# Altium footprint library PBL - THD Packages.PcbLib: 160 footprints (part 6 of 10)
Each footprint in its own frame and in the unit in brackets; x right, y up, seen from the top. Pads: shape width x height; smd on the part's side, far side on the other; paste and mask are expansions set on the pad; w line width, h text height; cw(c..) or ccw(c..) is an arc to the next point about the centre after c.
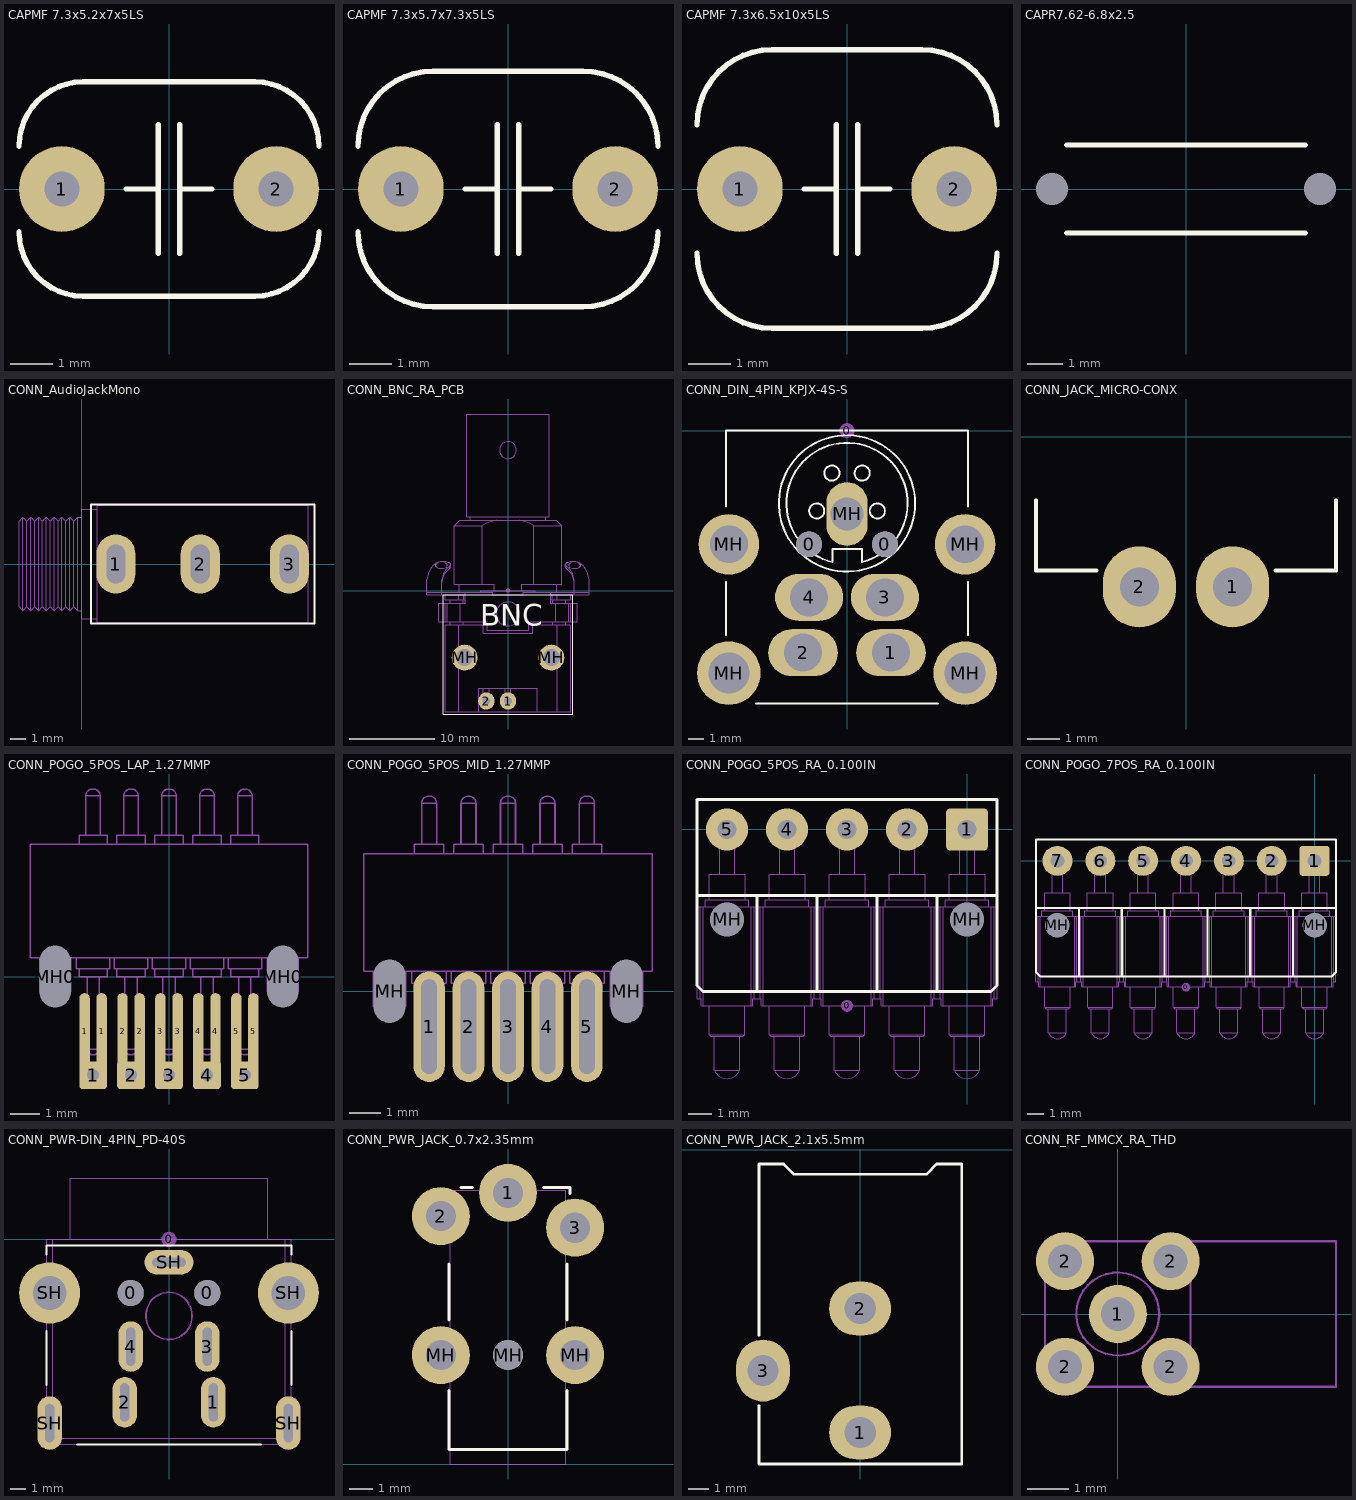
[diagram p5: the footprints below, top view; thin cyan lines are the x and y axes]

## CAPMF 7.3x5.2x7x5LS [mm] "Capacitor, THT, Metallized Polyester Film"
height 7
pads (2):
  round 2 hole 0.813: 1(-2.5,0) 2(2.5,0)
Top Overlay:
  lines w0.127: -3.5,-1 ccw(c-2,-1) -2,-2.5 2,-2.5 ccw(c2,-1) 3.5,-1 ; -3.5,1 cw(c-2,1) -2,2.5 2,2.5 cw(c2,1) 3.5,1 ; -1,0 -0.25,0 ; -0.25,-1.5 -0.25,1.5 ; 0.25,-1.5 0.25,1.5 ; 0.25,0 1,0
3D body: height 8, standoff -2, extent -3.65,-2.6 3.65,2.6

## CAPMF 7.3x5.7x7.3x5LS [mm] "Capacitor, THT, Metallized Polyester Film"
height 7
pads (2):
  round 2 hole 0.813: 1(-2.5,0) 2(2.5,0)
Top Overlay:
  lines w0.127: -3.5,-1 ccw(c-1.75,-1) -1.75,-2.75 1.75,-2.75 ccw(c1.75,-1) 3.5,-1 ; -3.5,1 cw(c-1.75,1) -1.75,2.75 1.75,2.75 cw(c1.75,1) 3.5,1 ; -1,0 -0.25,0 ; -0.25,-1.5 -0.25,1.5 ; 0.25,-1.5 0.25,1.5 ; 0.25,0 1,0
3D body: height 8.3, standoff -2, extent -3.65,-2.85 3.65,2.85

## CAPMF 7.3x6.5x10x5LS [mm] "Capacitor, THT, Metallized Polyester Film"
height 10
pads (2):
  round 2 hole 0.813: 1(-2.5,0) 2(2.5,0)
Top Overlay:
  lines w0.127: -3.5,-1.5 ccw(c-1.75,-1.5) -1.75,-3.25 1.75,-3.25 ccw(c1.75,-1.5) 3.5,-1.5 ; -3.5,1.5 cw(c-1.75,1.5) -1.75,3.25 1.75,3.25 cw(c1.75,1.5) 3.5,1.5 ; -1,0 -0.25,0 ; -0.25,-1.5 -0.25,1.5 ; 0.25,-1.5 0.25,1.5 ; 0.25,0 1,0
3D body: height 11, standoff -2, extent -3.65,-3.25 3.65,3.25

## CAPR7.62-6.8x2.5 [mil] "Capacitor, MF, Thru-Hole, Dipped Radial; Body 6.8 x 2.5 mm (WxT) Pin Spacing 7.62 mm (typ)"
height 236.22
pads (2):
  round 0 / inner round 0 / far side oval 100x85 hole 36 unplated: 1(-150,0) 2(150,0)
Top Overlay:
  lines w6: -133.86,-49.21 133.86,-49.21 ; -133.86,49.21 133.86,49.21
3D body: height 511.81, standoff -100, extent -202.75,-118.1 202.76,118.12

## CONN_AudioJackMono [mm] "CUI MJ-3502 3.5mm audio jack - mono"
height 11.3
pads (3):
  oval 2.5x3.8 hole 1.2 slot 2.5 at 90 deg: 1(2.2,0) 2(7.6,0) 3(13.3,0)
Top Overlay:
  lines w0.127: 0.6,-3.8 0.6,3.8 14.9,3.8 14.9,-3.8 0.6,-3.8
13 - 3D Top Side:
  lines w0.05: 0,-3 -0.25,-3 ; 0,3 -0.25,3 ; 1,-3.5 0,-3.5 0,3.5 1,3.5 ; -3.75,-3 -4,-2.75 -4,2.75 -3.75,3 ; -3.75,-3 -3.5,-2.75 ; -3.75,-3 -3.75,3 ; -3.75,3 -3.5,2.75 ; -3.5,-2.75 -3.25,-3 ; -3.5,-2.75 -3.5,2.75 ; -3.5,2.75 -3.25,3 ; -3.25,-3 -3,-2.75 ; -3.25,-3 -3.25,3 ; -3.25,3 -3,2.75 ; -3,-2.75 -2.75,-3 ; -3,-2.75 -3,2.75 ; -3,2.75 -2.75,3 ; -2.75,-3 -2.5,-2.75 ; -2.75,-3 -2.75,3 ; -2.75,3 -2.5,2.75 ; -2.5,-2.75 -2.25,-3 ; -2.5,-2.75 -2.5,2.75 ; -2.5,2.75 -2.25,3 ; -2.25,-3 -2,-2.75 ; -2.25,-3 -2.25,3 ; -2.25,3 -2,2.75 ; -2,-2.75 -1.75,-3 ; -2,-2.75 -2,2.75 ; -2,2.75 -1.75,3 ; -1.75,-3 -1.5,-2.75 ; -1.75,-3 -1.75,3 ; -1.75,3 -1.5,2.75 ; -1.5,-2.75 -1.25,-3 ; -1.5,-2.75 -1.5,2.75 ; -1.5,2.75 -1.25,3 ; -1.25,-3 -1,-2.75 ; -1.25,-3 -1.25,3 ; -1.25,3 -1,2.75 ; -1,-2.75 -0.75,-3 ; -1,-2.75 -1,2.75 ; -1,2.75 -0.75,3 ; -0.75,-3 -0.5,-2.75 ; -0.75,-3 -0.75,3 ; -0.75,3 -0.5,2.75 ; -0.5,-2.75 -0.25,-3 ; -0.5,-2.75 -0.5,2.75 ; -0.5,2.75 -0.25,3 ; -0.25,-3 -0.25,3 ; 1,-3.75 14.5,-3.75 14.5,3.75 1,3.75 1,-3.75
3D body: height 11.3, standoff -4.1, extent -4,-3.75 14.5,3.75

## CONN_BNC_RA_PCB [mil] "BNC connector, right angle PCB-mounted"
height 530
pads (5):
  round 20 on Mech15: 0(0,0)
  oval 75x80 hole 35: 1(0,-510) 2(-100,-510)
  round 120 hole 79: MH(-200,-310) MH(200,-310)
Top Overlay:
  lines w5: -300,-570 -300,-20 300,-20 300,-570 -300,-570
  text "BNC" at -127.35,-163 h100
13 - 3D Top Side:
  drawing of 173 lines, arcs and shapes, not listed
3D body: height 532, standoff -135, extent -375,-559.78 375,815.22

## CONN_DIN_4PIN_KPJX-4S-S [mm] "Power Connector, 4-pin DIN"
height 15
pads (12):
  round 1.7 hole 1.7 unplated: 0(-2.5,-7.5) 0(2.5,-7.5)
  round 1 on Mech15: 0(0,0)
  oval 4.6x3.1 hole 2.5: 1(2.9,-14.65) 2(-2.9,-14.65)
  oval 4.5x3.1 hole 2.5: 3(2.5,-11) 4(-2.5,-11)
  round 4.2 hole 2.7: MH(-7.8,-16) MH(7.8,-16)
  round 4 hole 2.5: MH(-7.8,-7.5) MH(7.8,-7.5)
  oval 2.7x4.2 hole 2.2: MH(0,-5.5)
Top Overlay:
  circle w0.127: c2,-5.3 r0.5
  circle w0.127: c-2,-5.3 r0.5
  circle w0.127: c-1,-2.8 r0.5
  circle w0.127: c1,-2.8 r0.5
  circle w0.127: c0,-4.8 r4.5
  lines w0.127: -8,-13.5 -8,-10 ; -8,-5 -8,0 8,0 8,-5 ; -6,-18 6,-18 ; 1,-8.671 1,-7.8 -0.97,-7.8 -0.97,-8.681 cw(c0,-4.8) 1.007,-8.671 ; 8,-13.5 8,-10
3D body: height 15.01, standoff -3.49, extent -8,-17.65 8,0

## CONN_JACK_MICRO-CONX [mil] "Micro-ConX 17292-2PG-300"
height 480
pads (2):
  oval 90x100 hole 48: 1(57.5,-185) 2(-57.5,-185)
Top Overlay:
  lines w5: -185,-78.74 -185,-165 -110.24,-165 ; 110.24,-165 185,-165 185,-78.74
3D body: height 476.88, standoff -146.88, extent -312.51,-205 310.03,547.5

## CONN_POGO_5POS_LAP_1.27MMP [mm] "Programming connector; lap-soldered 5 Position pogo style, 0.050\" pitch"
height 1.308
pads (17):
  oval 0.35x2.54 smd: 1(-2.825,-1.825) 1(-2.255,-1.825) 2(-1.555,-1.825) 2(-0.985,-1.825) 3(-0.285,-1.825) 3(0.285,-1.825) 4(0.985,-1.825) 4(1.555,-1.825) 5(2.255,-1.825) 5(2.825,-1.825)
  rrect20% 0.925x0.925 hole 0.4 mask+0.1: 1(-2.54,-3.3) 2(-1.27,-3.3) 3(0,-3.3) 4(1.27,-3.3) 5(2.54,-3.3)
  oval 0.991x2.007 hole 1.041 slot 2.057 at 90 deg unplated: MH0(-3.81,0) MH0(3.81,0)
Top Solder:
  rectangle: 2.255,-3.075 2.83,-0.575
  rectangle: 0.985,-3.075 1.56,-0.575
  rectangle: -0.285,-3.075 0.29,-0.575
  rectangle: -1.555,-3.075 -0.98,-0.575
  rectangle: -2.825,-3.075 -2.25,-0.575
13 - 3D Top Side:
  lines w0.05: -4.331,0.635 -4.331,-0.508 -3.289,-0.508 -3.289,0.635 ; -3.099,0.635 -3.099,0.254 -1.981,0.254 -1.981,0.635 ; -3.01,0.254 -3.01,0 -2.07,0 -2.07,0.254 ; -3.01,4.42 -3.01,4.724 -2.07,4.724 -2.07,4.42 ; -2.781,4.724 -2.781,6.045 ; -2.743,0 -2.743,-2.438 ; -2.337,0 -2.337,-2.438 ; -2.299,4.724 -2.299,6.045 ; -1.829,0.635 -1.829,0.254 -0.711,0.254 -0.711,0.635 ; -1.74,0.254 -1.74,0 -0.8,0 -0.8,0.254 ; -1.74,4.42 -1.74,4.724 -0.8,4.724 -0.8,4.42 ; -1.511,4.724 -1.511,6.045 ; -1.473,0 -1.473,-2.438 ; -1.067,0 -1.067,-2.438 ; -1.029,4.724 -1.029,6.045 ; -0.559,0.635 -0.559,0.254 0.559,0.254 0.559,0.635 ; -0.47,0.254 -0.47,0 0.47,0 0.47,0.254 ; -0.47,4.42 -0.47,4.724 0.47,4.724 0.47,4.42 ; -0.241,4.724 -0.241,6.045 ; -0.203,0 -0.203,-2.438 ; 0.203,0 0.203,-2.438 ; 0.241,4.724 0.241,6.045 ; 0.711,0.635 0.711,0.254 1.829,0.254 1.829,0.635 ; 0.8,0.254 0.8,0 1.74,0 1.74,0.254 ; 0.8,4.42 0.8,4.724 1.74,4.724 1.74,4.42 ; 1.029,4.724 1.029,6.045 ; 1.067,0 1.067,-2.438 ; 1.473,0 1.473,-2.438 ; 1.511,4.724 1.511,6.045 ; 1.981,0.635 1.981,0.254 3.099,0.254 3.099,0.635 ; 2.07,0.254 2.07,0 3.01,0 3.01,0.254 ; 2.07,4.42 2.07,4.724 3.01,4.724 3.01,4.42 ; 2.299,4.724 2.299,6.045 ; 2.337,0 2.337,-2.438 ; 2.743,0 2.743,-2.438 ; 2.781,4.724 2.781,6.045 ; 3.289,0.635 3.289,-0.508 4.331,-0.508 4.331,0.635 ; -2.781,6.045 cw(c-2.553,6.045) -2.553,6.274 -2.527,6.274 cw(c-2.527,6.045) -2.299,6.045 ; -2.781,6.045 -2.299,6.045 ; -2.743,-2.438 ccw(c-2.565,-2.438) -2.565,-2.616 -2.515,-2.616 ccw(c-2.515,-2.438) -2.337,-2.438 ; -2.743,-2.438 -2.337,-2.438 ; -1.511,6.045 cw(c-1.283,6.045) -1.283,6.274 -1.257,6.274 cw(c-1.257,6.045) -1.029,6.045 ; -1.511,6.045 -1.029,6.045 ; -1.473,-2.438 ccw(c-1.295,-2.438) -1.295,-2.616 -1.245,-2.616 ccw(c-1.245,-2.438) -1.067,-2.438 ; -1.473,-2.438 -1.067,-2.438 ; -0.241,6.045 cw(c-0.013,6.045) -0.013,6.274 0.013,6.274 cw(c0.013,6.045) 0.241,6.045 ; -0.241,6.045 0.241,6.045 ; -0.203,-2.438 ccw(c-0.025,-2.438) -0.025,-2.616 0.025,-2.616 ccw(c0.025,-2.438) 0.203,-2.438 ; -0.203,-2.438 0.203,-2.438 ; 1.029,6.045 cw(c1.257,6.045) 1.257,6.274 1.283,6.274 cw(c1.283,6.045) 1.511,6.045 ; 1.029,6.045 1.511,6.045 ; 1.067,-2.438 ccw(c1.245,-2.438) 1.245,-2.616 1.295,-2.616 ccw(c1.295,-2.438) 1.473,-2.438 ; 1.067,-2.438 1.473,-2.438 ; 2.299,6.045 cw(c2.527,6.045) 2.527,6.274 2.553,6.274 cw(c2.553,6.045) 2.781,6.045 ; 2.299,6.045 2.781,6.045 ; 2.337,-2.438 ccw(c2.515,-2.438) 2.515,-2.616 2.565,-2.616 ccw(c2.565,-2.438) 2.743,-2.438 ; 2.337,-2.438 2.743,-2.438 ; -4.635,0.635 4.635,0.635 4.635,4.42 -4.635,4.42 -4.635,0.635
3D body: height 1.31, standoff -0.9, extent -4.635,-2.616 4.636,6.274

## CONN_POGO_5POS_MID_1.27MMP [mil] "Programming connector; lap-soldered 5 Position pogo style, 0.050\" pitch"
height 13
pads (7):
  oval 40x140 hole 20 slot 120 at 90 deg: 1(-100,-45) 2(-50,-45) 3(0,-45) 4(50,-45) 5(100,-45)
  oval 38x78 hole 40 slot 80 at 90 deg unplated: MH(-150,0) MH(150,0)
Top Overlay:
  text "." at -100,-150 h3.94
Bottom Overlay:
  text "." at -100,-150 h3.94
13 - 3D Top Side:
  lines w1.97: -170.5,25 -170.5,-20 -129.5,-20 -129.5,25 ; -122,25 -122,10 -78,10 -78,25 ; -118.5,10 -118.5,0 -81.5,0 -81.5,10 ; -118.5,174 -118.5,186 -81.5,186 -81.5,174 ; -109.5,186 -109.5,238 ; -108,0 -108,-96 ; -92,0 -92,-96 ; -90.5,186 -90.5,238 ; -72,25 -72,10 -28,10 -28,25 ; -68.5,10 -68.5,0 -31.5,0 -31.5,10 ; -68.5,174 -68.5,186 -31.5,186 -31.5,174 ; -59.5,186 -59.5,238 ; -58,0 -58,-96 ; -42,0 -42,-96 ; -40.5,186 -40.5,238 ; -22,25 -22,10 22,10 22,25 ; -18.5,10 -18.5,0 18.5,0 18.5,10 ; -18.5,174 -18.5,186 18.5,186 18.5,174 ; -9.5,186 -9.5,238 ; -8,0 -8,-96 ; 8,0 8,-96 ; 9.5,186 9.5,238 ; 28,25 28,10 72,10 72,25 ; 31.5,10 31.5,0 68.5,0 68.5,10 ; 31.5,174 31.5,186 68.5,186 68.5,174 ; 40.5,186 40.5,238 ; 42,0 42,-96 ; 58,0 58,-96 ; 59.5,186 59.5,238 ; 78,25 78,10 122,10 122,25 ; 81.5,10 81.5,0 118.5,0 118.5,10 ; 81.5,174 81.5,186 118.5,186 118.5,174 ; 90.5,186 90.5,238 ; 92,0 92,-96 ; 108,0 108,-96 ; 109.5,186 109.5,238 ; 129.5,25 129.5,-20 170.5,-20 170.5,25 ; -109.5,238 cw(c-100.5,238) -100.5,247 -99.5,247 cw(c-99.5,238) -90.5,238 ; -109.5,238 -90.5,238 ; -108,-96 ccw(c-101,-96) -101,-103 -99,-103 ccw(c-99,-96) -92,-96 ; -108,-96 -92,-96 ; -59.5,238 cw(c-50.5,238) -50.5,247 -49.5,247 cw(c-49.5,238) -40.5,238 ; -59.5,238 -40.5,238 ; -58,-96 ccw(c-51,-96) -51,-103 -49,-103 ccw(c-49,-96) -42,-96 ; -58,-96 -42,-96 ; -9.5,238 cw(c-0.5,238) -0.5,247 0.5,247 cw(c0.5,238) 9.5,238 ; -9.5,238 9.5,238 ; -8,-96 ccw(c-1,-96) -1,-103 1,-103 ccw(c1,-96) 8,-96 ; -8,-96 8,-96 ; 40.5,238 cw(c49.5,238) 49.5,247 50.5,247 cw(c50.5,238) 59.5,238 ; 40.5,238 59.5,238 ; 42,-96 ccw(c49,-96) 49,-103 51,-103 ccw(c51,-96) 58,-96 ; 42,-96 58,-96 ; 90.5,238 cw(c99.5,238) 99.5,247 100.5,247 cw(c100.5,238) 109.5,238 ; 90.5,238 109.5,238 ; 92,-96 ccw(c99,-96) 99,-103 101,-103 ccw(c101,-96) 108,-96 ; 92,-96 108,-96 ; -182.5,25 -182.5,174 182.5,174 182.5,25 -182.5,25
3D body: height 12.5, standoff -74.5, extent -182.49,-102.99 182.51,247

## CONN_POGO_5POS_RA_0.100IN [mil] "Connector; Pogo pins; 5 Position"
height 100
pads (8):
  round 20 on Mech15: 0(-200,-294)
  rrect20% 70x70 hole 32: 1(0,0)
  round 70 hole 32: 2(-100,0) 3(-200,0) 4(-300,0) 5(-400,0)
  round 55 hole 57 unplated: MH(-400,-150) MH(0,-150)
Top Overlay:
  lines w5: -450,-110 50,-110 ; -350,-270 -350,-110 ; -250,-270 -250,-110 ; -150,-270 -150,-110 ; -50,-270 -50,-110 ; -450,-260 -450,50 50,50 50,-260 40,-270 -440,-270 -450,-260
13 - 3D Top Side:
  lines w1.97: -445,-282 -445,-129 ; -440,-294 -440,-129 ; -436,-129 -436,-117 -364,-117 -364,-129 ; -430,-117 -430,-75 -370,-75 -370,-117 ; -429.5,-294 -429.5,-342.17 ; -421,-345 -421,-400.97 ; -412.5,-75 -412.5,0 cw(c-400,0) -387.5,0 -387.5,-75 ; -412.5,-25 -387.5,-25 ; -379,-345 -379,-400.97 ; -370.5,-294 -370.5,-342.17 ; -360,-294 -360,-129 ; -355,-282 -355,-129 ; -345,-282 -345,-129 ; -340,-294 -340,-129 ; -336,-129 -336,-117 -264,-117 -264,-129 ; -330,-117 -330,-75 -270,-75 -270,-117 ; -329.5,-294 -329.5,-342.17 ; -321,-345 -321,-400.97 ; -312.5,-75 -312.5,0 cw(c-300,0) -287.5,0 -287.5,-75 ; -312.5,-25 -287.5,-25 ; -279,-345 -279,-400.97 ; -270.5,-294 -270.5,-342.17 ; -260,-294 -260,-129 ; -255,-282 -255,-129 ; -245,-282 -245,-129 ; -240,-294 -240,-129 ; -236,-129 -236,-117 -164,-117 -164,-129 ; -230,-117 -230,-75 -170,-75 -170,-117 ; -229.5,-294 -229.5,-342.17 ; -221,-345 -221,-400.97 ; -212.5,-75 -212.5,0 cw(c-200,0) -187.5,0 -187.5,-75 ; -212.5,-25 -187.5,-25 ; -179,-345 -179,-400.97 ; -170.5,-294 -170.5,-342.17 ; -160,-294 -160,-129 ; -155,-282 -155,-129 ; -145,-282 -145,-129 ; -140,-294 -140,-129 ; -136,-129 -136,-117 -64,-117 -64,-129 ; -130,-117 -130,-75 -70,-75 -70,-117 ; -129.5,-294 -129.5,-342.17 ; -121,-345 -121,-400.97 ; -112.5,-75 -112.5,0 cw(c-100,0) -87.5,0 -87.5,-75 ; -112.5,-25 -87.5,-25 ; -79,-345 -79,-400.97 ; -70.5,-294 -70.5,-342.17 ; -60,-294 -60,-129 ; -55,-282 -55,-129 ; -45,-282 -45,-129 ; -40,-294 -40,-129 ; -36,-129 -36,-117 36,-117 36,-129 ; -30,-117 -30,-75 30,-75 30,-117 ; -29.5,-294 -29.5,-342.17 ; -21,-345 -21,-400.97 ; -12.5,-75 -12.5,0 cw(c0,0) 12.5,0 12.5,-75 ; -12.5,-25 12.5,-25 ; 21,-345 21,-400.97 ; 29.5,-294 29.5,-342.17 ; 40,-294 40,-129 ; 45,-282 45,-129 ; -429.5,-342.17 -426.67,-345 -373.33,-345 -370.5,-342.17 ; -429.5,-342.17 -370.5,-342.17 ; -421,-400.97 ccw(c-400,-392.27) -379,-400.97 ; -421,-400.97 -379,-400.97 ; -329.5,-342.17 -326.67,-345 -273.33,-345 -270.5,-342.17 ; -329.5,-342.17 -270.5,-342.17 ; -321,-400.97 ccw(c-300,-392.27) -279,-400.97 ; -321,-400.97 -279,-400.97 ; -229.5,-342.17 -226.67,-345 -173.33,-345 -170.5,-342.17 ; -229.5,-342.17 -170.5,-342.17 ; -221,-400.97 ccw(c-200,-392.27) -179,-400.97 ; -221,-400.97 -179,-400.97 ; -129.5,-342.17 -126.67,-345 -73.33,-345 -70.5,-342.17 ; -129.5,-342.17 -70.5,-342.17 ; -121,-400.97 ccw(c-100,-392.27) -79,-400.97 ; -121,-400.97 -79,-400.97 ; -29.5,-342.17 -26.67,-345 26.67,-345 29.5,-342.17 ; -29.5,-342.17 29.5,-342.17 ; -21,-400.97 ccw(c0,-392.27) 21,-400.97 ; -21,-400.97 21,-400.97 ; -450,-282 -443.33,-282 -443.33,-294 -356.67,-294 -356.67,-282 -343.33,-282 -343.33,-294 -256.67,-294 -256.67,-282 -243.33,-282 -243.33,-294 -156.67,-294 -156.67,-282 -143.33,-282 -143.33,-294 -56.67,-294 -56.67,-282 -43.33,-282 -43.33,-294 43.33,-294 43.33,-282 50,-282 50,-129 -450,-129 -450,-282
3D body: height 100, standoff -127, extent -449.99,-414.99 50.01,12.51

## CONN_POGO_7POS_RA_0.100IN [mil] "Connector; Pogo pins; 7 Position"
height 100
pads (10):
  round 20 on Mech15: 0(-300,-295)
  rrect20% 70x70 hole 32: 1(0,0)
  round 70 hole 32: 2(-100,0) 3(-200,0) 4(-300,0) 5(-400,0) 6(-500,0) 7(-600,0)
  round 55 hole 57 unplated: MH(-600,-150) MH(0,-150)
Top Overlay:
  lines w5: -650,-110 50,-110 ; -550,-270 -550,-110 ; -450,-270 -450,-110 ; -350,-270 -350,-110 ; -250,-270 -250,-110 ; -150,-270 -150,-110 ; -50,-270 -50,-110 ; -650,-260 -640,-270 40,-270 50,-260 50,50 -650,50 -650,-260
13 - 3D Top Side:
  drawing of 200 lines, arcs and shapes, not listed
3D body: height 100, standoff -127, extent -649.99,-415 50.01,12.5

## CONN_PWR-DIN_4PIN_PD-40S [mm] "Power Connector, 4-pin DIN"
height 15
pads (12):
  round 1.7 hole 1.7 unplated: 0(-2.5,-3.5) 0(2.5,-3.5)
  round 1 on Mech15: 0(0,0)
  oval 1.6x3.3 hole 0.6 slot 2.5 at 90 deg: 1(2.9,-10.65) 2(-2.9,-10.65) 3(2.5,-7) 4(-2.5,-7)
  oval 1.6x3.5 hole 0.6 slot 2.5 at 90 deg: SH(-7.8,-12) SH(7.8,-12)
  round 4 hole 2.2: SH(-7.8,-3.5) SH(7.8,-3.5)
  oval 3.2x1.6 hole 0.6 slot 2.2 at 0 deg: SH(0,-1.5)
Top Overlay:
  lines w0.127: -8,-9.5 -8,-6 ; -8,-1 -8,-0.4 8,-0.4 8,-1 ; -6,-13.4 6,-13.4 ; 8,-9.5 8,-6
13 - 3D Top Side:
  circle w0.05: c0,-5 r1.5
  circle w0.05: c0,-5 r1.55
  lines w0.05: -7.6,0 -7.6,-13.4 ; -6.45,0 -6.45,4 6.45,4 6.45,0 ; 7.6,0 7.6,-13.4 ; -8,-13 ccw(c-7.6,-13) -7.6,-13.4 ; -8,-13 -8,0 8,0 8,-13 ; -8,-13 8,-13 ; -7.6,-13.4 7.6,-13.4 ; 7.6,-13.4 ccw(c7.6,-13) 8,-13
3D body: height 15, standoff -3.5, extent -8,-13.4 8,4

## CONN_PWR_JACK_0.7x2.35mm [mm] "Power Connector, 0.7mm ID, 2.35mm OD"
height 5
pads (6):
  round 2.5 hole 1.3: 1(0,11.7) 2(-2.9,10.7) 3(2.9,10.2) MH(-2.9,4.7) MH(2.9,4.7)
  round 1.3 hole 1.3 unplated: MH(0,4.7)
Top Overlay:
  lines w0.127: -2.54,3.175 -2.54,0.635 2.54,0.635 2.54,3.175 ; -2.54,6.223 -2.54,8.636 ; -2.032,11.938 -1.524,11.938 ; 1.524,11.938 2.667,11.938 2.667,11.684 ; 2.54,6.223 2.54,8.636
13 - 3D Top Side:
  lines w0.05: -2.819,4.204 -2.819,5.194 ; -2.819,10.198 -2.819,11.189 ; -2.502,4.204 -3.073,4.204 -3.073,5.194 -2.502,5.194 ; -2.502,10.198 -3.073,10.198 -3.073,11.189 -2.502,11.189 ; -0.495,11.811 -0.495,11.938 0.495,11.938 0.495,11.811 ; 2.502,4.204 3.073,4.204 3.073,5.194 2.502,5.194 ; 2.502,9.716 3.073,9.716 3.073,10.706 2.502,10.706 ; 2.819,4.204 2.819,5.194 ; 2.819,9.716 2.819,10.706 ; -2.502,0 2.502,0 2.502,11.811 -2.502,11.811 -2.502,0
3D body: height 5, standoff -2.5, extent -3.309,0 3.309,12.054

## CONN_PWR_JACK_2.1x5.5mm [mm] "Power Connector, 2.1mm ID, 5.5mm OD"
height 11
pads (3):
  oval 3x2.6 hole 1.511: 1(0,-13.7) 2(0,-7.7)
  oval 2.6x3 hole 1.511: 3(-4.7,-10.7)
Top Overlay:
  lines w0.127: -4.9,-12.4 -4.9,-15.225 4.925,-15.225 4.925,-0.7 3.7,-0.7 3.2,-1.2 -3.2,-1.2 -3.7,-0.7 -4.9,-0.7 -4.9,-9
13 - 3D Top Side:
  lines w0.076: -4.9,-12.4 -4.9,-15.225 4.925,-15.225 4.925,-0.7 3.7,-0.7 3.2,-1.2 -3.2,-1.2 -3.7,-0.7 -4.9,-0.7 -4.9,-9
3D body: height 11, standoff -3.5, extent -4.9,-14.1 4.5,0

## CONN_RF_MMCX_RA_THD [mil] "RF connector, right-angle THD, TE 1-1634010-0 or TE 1408151"
height 149.61
pads (5):
  round 55 hole 32: 1(0,0) 2(-50,-50) 2(-50,50) 2(50,-50) 2(50,50)
13 - 3D Top Side:
  circle w1.97: c0,0 r13.78
  circle w1.97: c-0.09,0.01 r39.37
  lines w1.97: -68.9,-39.37 -39.37,-39.37 -39.37,-68.9 ; -68.9,39.37 -39.37,39.37 -39.37,68.9 ; -38.07,-9.54 ccw(c-3.54,-2.06) -29.28,-26.26 ; 9.57,-38.16 ccw(c1.62,-3.49) 26.2,-29.2 ; 29.21,26.34 cw(c3.99,2.19) 38.14,9.49 ; 37.1,-13.16 ccw(c4.48,-1.02) 39.27,-2.07 ; 39.37,-68.9 39.37,-39.37 68.9,-39.37 ; 39.37,68.9 39.37,39.37 68.9,39.37 ; 68.9,-68.9 68.9,68.9 ; -68.9,-68.9 206.69,-68.9 206.69,68.9 -68.9,68.9 -68.9,-68.9 ; -59.84,-59.84 -40.16,-59.84 -40.16,-40.16 -59.84,-40.16 -59.84,-59.84 ; -59.84,40.16 -40.16,40.16 -40.16,59.84 -59.84,59.84 -59.84,40.16 ; 40.16,-59.84 40.16,-40.16 59.84,-40.16 59.84,-59.84 40.16,-59.84 ; 40.16,40.16 40.16,59.84 59.84,59.84 59.84,40.16 40.16,40.16
3D body: height 149.61, standoff -118.11, extent -68.89,-68.89 206.7,68.9